# Altium footprint library WR-TBL_Pluggable Connector_3.50mm.PcbLib: 175 footprints (part 3 of 11)
Each footprint in its own frame and in the unit in brackets; x right, y up, seen from the top. Pads: shape width x height; smd on the part's side, far side on the other; paste and mask are expansions set on the pad; w line width, h text height; cw(c..) or ccw(c..) is an arc to the next point about the centre after c.
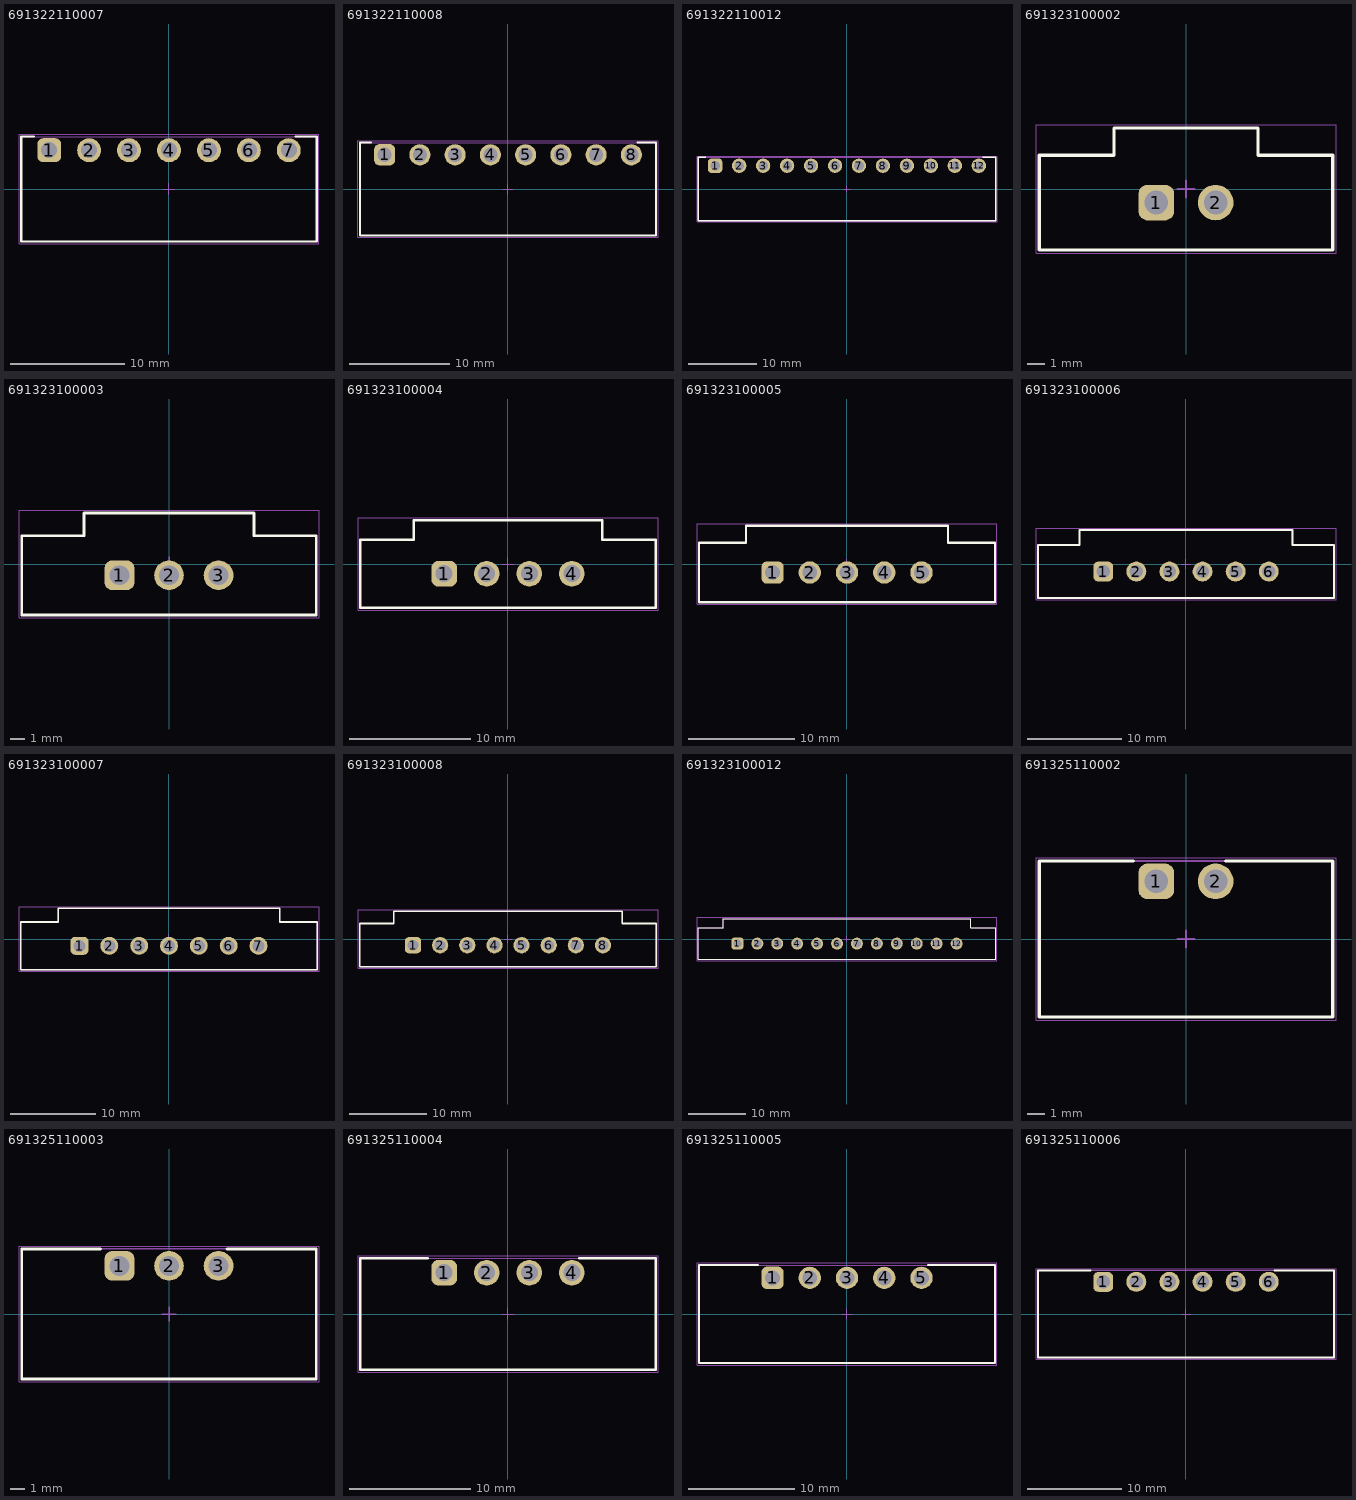
[diagram p2: the footprints below, top view; thin cyan lines are the x and y axes]

## 691322110007 [mm] "Horizontal PCB Header, pitch 3.5mm, 07p"
height 7
pads (7):
  rrect50% 2.1x2.1 hole 1.4: 1(-10.5,3.4)
  round 2.1 hole 1.4: 2(-7,3.4) 3(-3.5,3.4) 4(0,3.4) 5(3.5,3.4) 6(7,3.4) 7(10.5,3.4)
Top Overlay:
  lines w0.2: -11.85,4.6 -12.95,4.6 -12.95,-4.6 12.95,-4.6 12.95,4.6 11.1,4.6
Top Assembly:
  lines w0.1: -12.95,-4.6 12.95,-4.6 12.95,4.6 -12.95,4.6 -12.95,-4.6
Top Designator:
  text ".Designator" at -3.647,-0.357 h1
Top 3D Body:
  lines w0.1: -12.95,-4.6 -12.95,4.6 12.95,4.6 12.95,-4.6 -12.95,-4.6
Top Courtyard:
  lines w0.05: -13.15,-4.8 13.15,-4.8 13.15,4.8 -13.15,4.8 -13.15,-4.8
Top Component Center:
  lines w0.1: -0.5,0 0.5,0 ; 0,-0.5 0,0.5
3D body "691322110007.stp": height 7.3, standoff -3.4, extent -12.95,-4.6 12.95,4.6

## 691322110008 [mm] "Horizontal PCB Header, pitch 3.5mm, 08p"
height 7
pads (8):
  rrect50% 2.1x2.1 hole 1.4: 1(-12.25,3.4)
  round 2.1 hole 1.4: 2(-8.75,3.4) 3(-5.25,3.4) 4(-1.75,3.4) 5(1.75,3.4) 6(5.25,3.4) 7(8.75,3.4) 8(12.25,3.4)
Top Overlay:
  lines w0.2: -13.6,4.6 -14.7,4.6 -14.7,-4.6 14.7,-4.6 14.7,4.6 12.85,4.6
Top Assembly:
  lines w0.1: -14.7,-4.6 -14.7,4.6 14.7,4.6 14.7,-4.6 -14.7,-4.6
Top Designator:
  text ".Designator" at -3.647,-0.357 h1
Top 3D Body:
  lines w0.1: -14.7,-4.6 14.7,-4.6 14.7,4.6 -14.7,4.6 -14.7,-4.6
Top Courtyard:
  lines w0.05: -14.9,-4.8 -14.9,4.8 14.9,4.8 14.9,-4.8 -14.9,-4.8
Top Component Center:
  lines w0.1: -0.5,0 0.5,0 ; 0,-0.5 0,0.5
3D body "691322110008.stp": height 7.3, standoff -3.4, extent -14.7,-4.6 14.7,4.6

## 691322110012 [mm] "Horizontal PCB Header, pitch 3.5mm, 12p"
height 7
pads (12):
  rrect50% 2.1x2.1 hole 1.4: 1(-19.25,3.4)
  round 2.1 hole 1.4: 2(-15.75,3.4) 3(-12.25,3.4) 4(-8.75,3.4) 5(-5.25,3.4) 6(-1.75,3.4) 7(1.75,3.4) 8(5.25,3.4) 9(8.75,3.4) 10(12.25,3.4) 11(15.75,3.4) 12(19.25,3.4)
Top Overlay:
  lines w0.2: -20.6,4.6 -21.7,4.6 -21.7,-4.6 21.7,-4.6 21.7,4.6 19.85,4.6
Top Assembly:
  lines w0.1: -21.7,-4.6 21.7,-4.6 21.7,4.6 -21.7,4.6 -21.7,-4.6
Top Designator:
  text ".Designator" at -3.647,-0.357 h1
Top 3D Body:
  lines w0.1: -21.7,-4.6 -21.7,4.6 21.7,4.6 21.7,-4.6 -21.7,-4.6
Top Courtyard:
  lines w0.05: -21.9,-4.8 21.9,-4.8 21.9,4.8 -21.9,4.8 -21.9,-4.8
Top Component Center:
  lines w0.1: -0.5,0 0.5,0 ; 0,-0.5 0,0.5
3D body "691322110012.stp": height 7.3, standoff -3.4, extent -21.7,-4.6 21.7,4.6

## 691323100002 [mm] "Vertical PCB Header with Flanges, pitch 3.5mm, 02p"
height 9.2
pads (2):
  rrect50% 2.1x2.1 hole 1.4: 1(-1.75,-0.8)
  round 2.1 hole 1.4: 2(1.75,-0.8)
Top Overlay:
  lines w0.2: -8.65,-3.6 -8.65,2 -4.25,2 -4.25,3.6 4.25,3.6 4.25,2 8.65,2 8.65,-3.6 -8.65,-3.6
Top Assembly:
  lines w0.1: -8.65,-3.6 8.65,-3.6 8.65,2 4.25,2 4.25,3.6 -4.25,3.6 -4.25,2 -8.65,2 -8.65,-3.6
Top Designator:
  text ".Designator" at -3.647,-0.357 h1
Top 3D Body:
  lines w0.1: -8.65,-3.6 -8.65,2 -4.25,2 -4.25,3.6 4.25,3.6 4.25,2 8.65,2 8.65,-3.6 -8.65,-3.6
Top Courtyard:
  lines w0.05: -8.85,-3.8 -8.85,3.8 8.85,3.8 8.85,-3.8 -8.85,-3.8
Top Component Center:
  lines w0.1: -0.5,0 0.5,0 ; 0,-0.5 0,0.5
3D body "691323100002.stp": height 9.3, standoff -3.4, extent -8.65,-3.6 8.65,3.6

## 691323100003 [mm] "Vertical PCB Header with Flanges, pitch 3.5mm, 03p"
height 9.2
pads (3):
  rrect50% 2.1x2.1 hole 1.4: 1(-3.5,-0.8)
  round 2.1 hole 1.4: 2(0,-0.8) 3(3.5,-0.8)
Top Overlay:
  lines w0.2: -10.4,-3.6 10.4,-3.6 10.4,2 6,2 6,3.6 -6,3.6 -6,2 -10.4,2 -10.4,-3.6
Top Assembly:
  lines w0.1: -10.4,-3.6 -10.4,2 -6,2 -6,3.6 6,3.6 6,2 10.4,2 10.4,-3.6 -10.4,-3.6
Top Designator:
  text ".Designator" at -3.647,-0.357 h1
Top 3D Body:
  lines w0.1: -10.4,-3.6 10.4,-3.6 10.4,2 6,2 6,3.6 -6,3.6 -6,2 -10.4,2 -10.4,-3.6
Top Courtyard:
  lines w0.05: -10.6,-3.8 10.6,-3.8 10.6,3.8 -10.6,3.8 -10.6,-3.8
Top Component Center:
  lines w0.1: -0.5,0 0.5,0 ; 0,-0.5 0,0.5
3D body "691323100003.stp": height 9.3, standoff -3.4, extent -10.4,-3.6 10.4,3.6

## 691323100004 [mm] "Vertical PCB Header with Flanges, pitch 3.5mm, 04p"
height 9.2
pads (4):
  rrect50% 2.1x2.1 hole 1.4: 1(-5.25,-0.8)
  round 2.1 hole 1.4: 2(-1.75,-0.8) 3(1.75,-0.8) 4(5.25,-0.8)
Top Overlay:
  lines w0.2: -12.15,-3.6 12.15,-3.6 12.15,2 7.75,2 7.75,3.6 -7.75,3.6 -7.75,2 -12.15,2 -12.15,-3.6
Top Assembly:
  lines w0.1: -12.15,-3.6 -12.15,2 -7.75,2 -7.75,3.6 7.75,3.6 7.75,2 12.15,2 12.15,-3.6 -12.15,-3.6
Top Designator:
  text ".Designator" at -3.647,-0.357 h1
Top 3D Body:
  lines w0.1: -12.15,-3.6 12.15,-3.6 12.15,2 7.75,2 7.75,3.6 -7.75,3.6 -7.75,2 -12.15,2 -12.15,-3.6
Top Courtyard:
  lines w0.05: -12.35,-3.8 12.35,-3.8 12.35,3.8 -12.35,3.8 -12.35,-3.8
Top Component Center:
  lines w0.1: -0.5,0 0.5,0 ; 0,-0.5 0,0.5
3D body "691323100004.stp": height 9.3, standoff -3.4, extent -12.15,-3.6 12.15,3.6

## 691323100005 [mm] "Vertical PCB Header with Flanges, pitch 3.5mm, 05p"
height 9.2
pads (5):
  rrect50% 2.1x2.1 hole 1.4: 1(-7,-0.8)
  round 2.1 hole 1.4: 2(-3.5,-0.8) 3(0,-0.8) 4(3.5,-0.8) 5(7,-0.8)
Top Overlay:
  lines w0.2: -13.9,-3.6 13.9,-3.6 13.9,2 9.5,2 9.5,3.6 -9.5,3.6 -9.5,2 -13.9,2 -13.9,-3.6
Top Assembly:
  lines w0.1: -13.9,-3.6 -13.9,2 -9.5,2 -9.5,3.6 9.5,3.6 9.5,2 13.9,2 13.9,-3.6 -13.9,-3.6
Top Designator:
  text ".Designator" at -3.647,-0.357 h1
Top 3D Body:
  lines w0.1: -13.9,-3.6 13.9,-3.6 13.9,2 9.5,2 9.5,3.6 -9.5,3.6 -9.5,2 -13.9,2 -13.9,-3.6
Top Courtyard:
  lines w0.05: -14.1,-3.8 14.1,-3.8 14.1,3.8 -14.1,3.8 -14.1,-3.8
Top Component Center:
  lines w0.1: -0.5,0 0.5,0 ; 0,-0.5 0,0.5
3D body "691323100005.stp": height 9.3, standoff -3.4, extent -13.9,-3.6 13.9,3.6

## 691323100006 [mm] "Vertical PCB Header with Flanges, pitch 3.5mm, 06p"
height 9.2
pads (6):
  rrect50% 2.1x2.1 hole 1.4: 1(-8.75,-0.8)
  round 2.1 hole 1.4: 2(-5.25,-0.8) 3(-1.75,-0.8) 4(1.75,-0.8) 5(5.25,-0.8) 6(8.75,-0.8)
Top Overlay:
  lines w0.2: -15.65,-3.6 15.65,-3.6 15.65,2 11.25,2 11.25,3.6 -11.25,3.6 -11.25,2 -15.65,2 -15.65,-3.6
Top Assembly:
  lines w0.1: -15.65,-3.6 -15.65,2 -11.25,2 -11.25,3.6 11.25,3.6 11.25,2 15.65,2 15.65,-3.6 -15.65,-3.6
Top Designator:
  text ".Designator" at -3.647,-0.357 h1
Top 3D Body:
  lines w0.1: -15.65,-3.6 15.65,-3.6 15.65,2 11.25,2 11.25,3.6 -11.25,3.6 -11.25,2 -15.65,2 -15.65,-3.6
Top Courtyard:
  lines w0.05: -15.85,-3.8 15.85,-3.8 15.85,3.8 -15.85,3.8 -15.85,-3.8
Top Component Center:
  lines w0.1: -0.5,0 0.5,0 ; 0,-0.5 0,0.5
3D body "691323100006.stp": height 9.3, standoff -3.4, extent -15.65,-3.6 15.65,3.6

## 691323100007 [mm] "Vertical PCB Header with Flanges, pitch 3.5mm, 07p"
height 9.2
pads (7):
  rrect50% 2.1x2.1 hole 1.4: 1(-10.5,-0.8)
  round 2.1 hole 1.4: 2(-7,-0.8) 3(-3.5,-0.8) 4(0,-0.8) 5(3.5,-0.8) 6(7,-0.8) 7(10.5,-0.8)
Top Overlay:
  lines w0.2: -17.4,-3.6 -17.4,2 -13,2 -13,3.6 13,3.6 13,2 17.4,2 17.4,-3.6 -17.4,-3.6
Top Assembly:
  lines w0.1: -17.4,-3.6 17.4,-3.6 17.4,2 13,2 13,3.6 -13,3.6 -13,2 -17.4,2 -17.4,-3.6
Top Designator:
  text ".Designator" at -3.647,-0.357 h1
Top 3D Body:
  lines w0.1: -17.4,-3.6 -17.4,2 -13,2 -13,3.6 13,3.6 13,2 17.4,2 17.4,-3.6 -17.4,-3.6
Top Courtyard:
  lines w0.05: -17.6,-3.8 -17.6,3.8 17.6,3.8 17.6,-3.8 -17.6,-3.8
Top Component Center:
  lines w0.1: -0.5,0 0.5,0 ; 0,-0.5 0,0.5
3D body "691323100007.stp": height 9.3, standoff -3.4, extent -17.4,-3.6 17.4,3.6

## 691323100008 [mm] "Vertical PCB Header with Flanges, pitch 3.5mm, 08p"
height 9.2
pads (8):
  rrect50% 2.1x2.1 hole 1.4: 1(-12.25,-0.8)
  round 2.1 hole 1.4: 2(-8.75,-0.8) 3(-5.25,-0.8) 4(-1.75,-0.8) 5(1.75,-0.8) 6(5.25,-0.8) 7(8.75,-0.8) 8(12.25,-0.8)
Top Overlay:
  lines w0.2: -19.15,-3.6 19.15,-3.6 19.15,2 14.75,2 14.75,3.6 -14.75,3.6 -14.75,2 -19.15,2 -19.15,-3.6
Top Assembly:
  lines w0.1: -19.15,-3.6 -19.15,2 -14.75,2 -14.75,3.6 14.75,3.6 14.75,2 19.15,2 19.15,-3.6 -19.15,-3.6
Top Designator:
  text ".Designator" at -3.647,-0.357 h1
Top 3D Body:
  lines w0.1: -19.15,-3.6 19.15,-3.6 19.15,2 14.75,2 14.75,3.6 -14.75,3.6 -14.75,2 -19.15,2 -19.15,-3.6
Top Courtyard:
  lines w0.05: -19.35,-3.8 19.35,-3.8 19.35,3.8 -19.35,3.8 -19.35,-3.8
Top Component Center:
  lines w0.1: -0.5,0 0.5,0 ; 0,-0.5 0,0.5
3D body "691323100008.stp": height 9.3, standoff -3.4, extent -19.15,-3.6 19.15,3.6

## 691323100012 [mm] "Vertical PCB Header with Flanges, pitch 3.5mm, 12p"
height 9.2
pads (12):
  rrect50% 2.1x2.1 hole 1.4: 1(-19.25,-0.8)
  round 2.1 hole 1.4: 2(-15.75,-0.8) 3(-12.25,-0.8) 4(-8.75,-0.8) 5(-5.25,-0.8) 6(-1.75,-0.8) 7(1.75,-0.8) 8(5.25,-0.8) 9(8.75,-0.8) 10(12.25,-0.8) 11(15.75,-0.8) 12(19.25,-0.8)
Top Overlay:
  lines w0.2: -26.15,-3.6 26.15,-3.6 26.15,2 21.75,2 21.75,3.6 -21.75,3.6 -21.75,2 -26.15,2 -26.15,-3.6
Top Assembly:
  lines w0.1: -26.15,-3.6 -26.15,2 -21.75,2 -21.75,3.6 21.75,3.6 21.75,2 26.15,2 26.15,-3.6 -26.15,-3.6
Top Designator:
  text ".Designator" at -3.647,-0.357 h1
Top 3D Body:
  lines w0.1: -26.15,-3.6 26.15,-3.6 26.15,2 21.75,2 21.75,3.6 -21.75,3.6 -21.75,2 -26.15,2 -26.15,-3.6
Top Courtyard:
  lines w0.05: -26.35,-3.8 26.35,-3.8 26.35,3.8 -26.35,3.8 -26.35,-3.8
Top Component Center:
  lines w0.1: -0.5,0 0.5,0 ; 0,-0.5 0,0.5
3D body "691323100012.stp": height 9.3, standoff -3.4, extent -26.15,-3.6 26.15,3.6

## 691325110002 [mm] "Horizontal PCB Header with Flanges, pitch 3.5mm, 02p"
height 7.2
pads (2):
  rrect50% 2.1x2.1 hole 1.4: 1(-1.75,3.4)
  round 2.1 hole 1.4: 2(1.75,3.4)
Top Overlay:
  lines w0.2: -3.1,4.6 -8.65,4.6 -8.65,-4.6 8.65,-4.6 8.65,4.6 2.35,4.6
Top Assembly:
  lines w0.1: -8.65,-4.6 8.65,-4.6 8.65,4.6 -8.65,4.6 -8.65,-4.6
Top Designator:
  text ".Designator" at -3.647,-0.357 h1
Top 3D Body:
  lines w0.1: -8.65,-4.6 -8.65,4.6 8.65,4.6 8.65,-4.6 -8.65,-4.6
Top Courtyard:
  lines w0.05: -8.85,-4.8 -8.85,4.8 8.85,4.8 8.85,-4.8 -8.85,-4.8
Top Component Center:
  lines w0.1: -0.5,0 0.5,0 ; 0,-0.5 0,0.5
3D body "691325110002.stp": height 7.3, standoff -3.5, extent -8.65,-4.6 8.65,4.6

## 691325110003 [mm] "Horizontal PCB Header with Flanges, pitch 3.5mm, 03p"
height 7.2
pads (3):
  rrect50% 2.1x2.1 hole 1.4: 1(-3.5,3.4)
  round 2.1 hole 1.4: 2(0,3.4) 3(3.5,3.4)
Top Overlay:
  lines w0.2: -4.85,4.6 -10.4,4.6 -10.4,-4.6 10.4,-4.6 10.4,4.6 4.1,4.6
Top Assembly:
  lines w0.1: -10.4,-4.6 -10.4,4.6 10.4,4.6 10.4,-4.6 -10.4,-4.6
Top Designator:
  text ".Designator" at -3.647,-0.357 h1
Top 3D Body:
  lines w0.1: -10.4,-4.6 10.4,-4.6 10.4,4.6 -10.4,4.6 -10.4,-4.6
Top Courtyard:
  lines w0.05: -10.6,-4.8 10.6,-4.8 10.6,4.8 -10.6,4.8 -10.6,-4.8
Top Component Center:
  lines w0.1: -0.5,0 0.5,0 ; 0,-0.5 0,0.5
3D body "691325110003.stp": height 7.3, standoff -3.5, extent -10.4,-4.6 10.4,4.6

## 691325110004 [mm] "Horizontal PCB Header with Flanges, pitch 3.5mm, 04p"
height 7.2
pads (4):
  rrect50% 2.1x2.1 hole 1.4: 1(-5.25,3.4)
  round 2.1 hole 1.4: 2(-1.75,3.4) 3(1.75,3.4) 4(5.25,3.4)
Top Overlay:
  lines w0.2: -6.6,4.6 -12.15,4.6 -12.15,-4.6 12.15,-4.6 12.15,4.6 5.85,4.6
Top Assembly:
  lines w0.1: -12.15,-4.6 12.15,-4.6 12.15,4.6 -12.15,4.6 -12.15,-4.6
Top Designator:
  text ".Designator" at -3.647,-0.357 h1
Top 3D Body:
  lines w0.1: -12.15,-4.6 -12.15,4.6 12.15,4.6 12.15,-4.6 -12.15,-4.6
Top Courtyard:
  lines w0.05: -12.35,-4.8 -12.35,4.8 12.35,4.8 12.35,-4.8 -12.35,-4.8
Top Component Center:
  lines w0.1: -0.5,0 0.5,0 ; 0,-0.5 0,0.5
3D body "691325110004.stp": height 7.3, standoff -3.5, extent -12.15,-4.6 12.15,4.6

## 691325110005 [mm] "Horizontal PCB Header with Flanges, pitch 3.5mm, 05p"
height 7.2
pads (5):
  rrect50% 2.1x2.1 hole 1.4: 1(-7,3.4)
  round 2.1 hole 1.4: 2(-3.5,3.4) 3(0,3.4) 4(3.5,3.4) 5(7,3.4)
Top Overlay:
  lines w0.2: -8.35,4.6 -13.9,4.6 -13.9,-4.6 13.9,-4.6 13.9,4.6 7.6,4.6
Top Assembly:
  lines w0.1: -13.9,-4.6 -13.9,4.6 13.9,4.6 13.9,-4.6 -13.9,-4.6
Top Designator:
  text ".Designator" at -3.647,-0.357 h1
Top 3D Body:
  lines w0.1: -13.9,-4.6 13.9,-4.6 13.9,4.6 -13.9,4.6 -13.9,-4.6
Top Courtyard:
  lines w0.05: -14.1,-4.8 14.1,-4.8 14.1,4.8 -14.1,4.8 -14.1,-4.8
Top Component Center:
  lines w0.1: -0.5,0 0.5,0 ; 0,-0.5 0,0.5
3D body "691325110005.stp": height 7.3, standoff -3.5, extent -13.9,-4.6 13.9,4.6

## 691325110006 [mm] "Horizontal PCB Header with Flanges, pitch 3.5mm, 06p"
height 7.2
pads (6):
  rrect50% 2.1x2.1 hole 1.4: 1(-8.75,3.4)
  round 2.1 hole 1.4: 2(-5.25,3.4) 3(-1.75,3.4) 4(1.75,3.4) 5(5.25,3.4) 6(8.75,3.4)
Top Overlay:
  lines w0.2: -10.1,4.6 -15.65,4.6 -15.65,-4.6 15.65,-4.6 15.65,4.6 9.35,4.6
Top Assembly:
  lines w0.1: -15.65,-4.6 15.65,-4.6 15.65,4.6 -15.65,4.6 -15.65,-4.6
Top Designator:
  text ".Designator" at -3.647,-0.357 h1
Top 3D Body:
  lines w0.1: -15.65,-4.6 -15.65,4.6 15.65,4.6 15.65,-4.6 -15.65,-4.6
Top Courtyard:
  lines w0.05: -15.85,-4.8 -15.85,4.8 15.85,4.8 15.85,-4.8 -15.85,-4.8
Top Component Center:
  lines w0.1: -0.5,0 0.5,0 ; 0,-0.5 0,0.5
3D body "691325110006.stp": height 7.3, standoff -3.5, extent -15.65,-4.6 15.65,4.6